# Altium footprint library S_S.PcbLib: 51 footprints (part 1 of 4)
Each footprint in its own frame and in the unit in brackets; x right, y up, seen from the top. Pads: shape width x height; smd on the part's side, far side on the other; paste and mask are expansions set on the pad; w line width, h text height; cw(c..) or ccw(c..) is an arc to the next point about the centre after c.
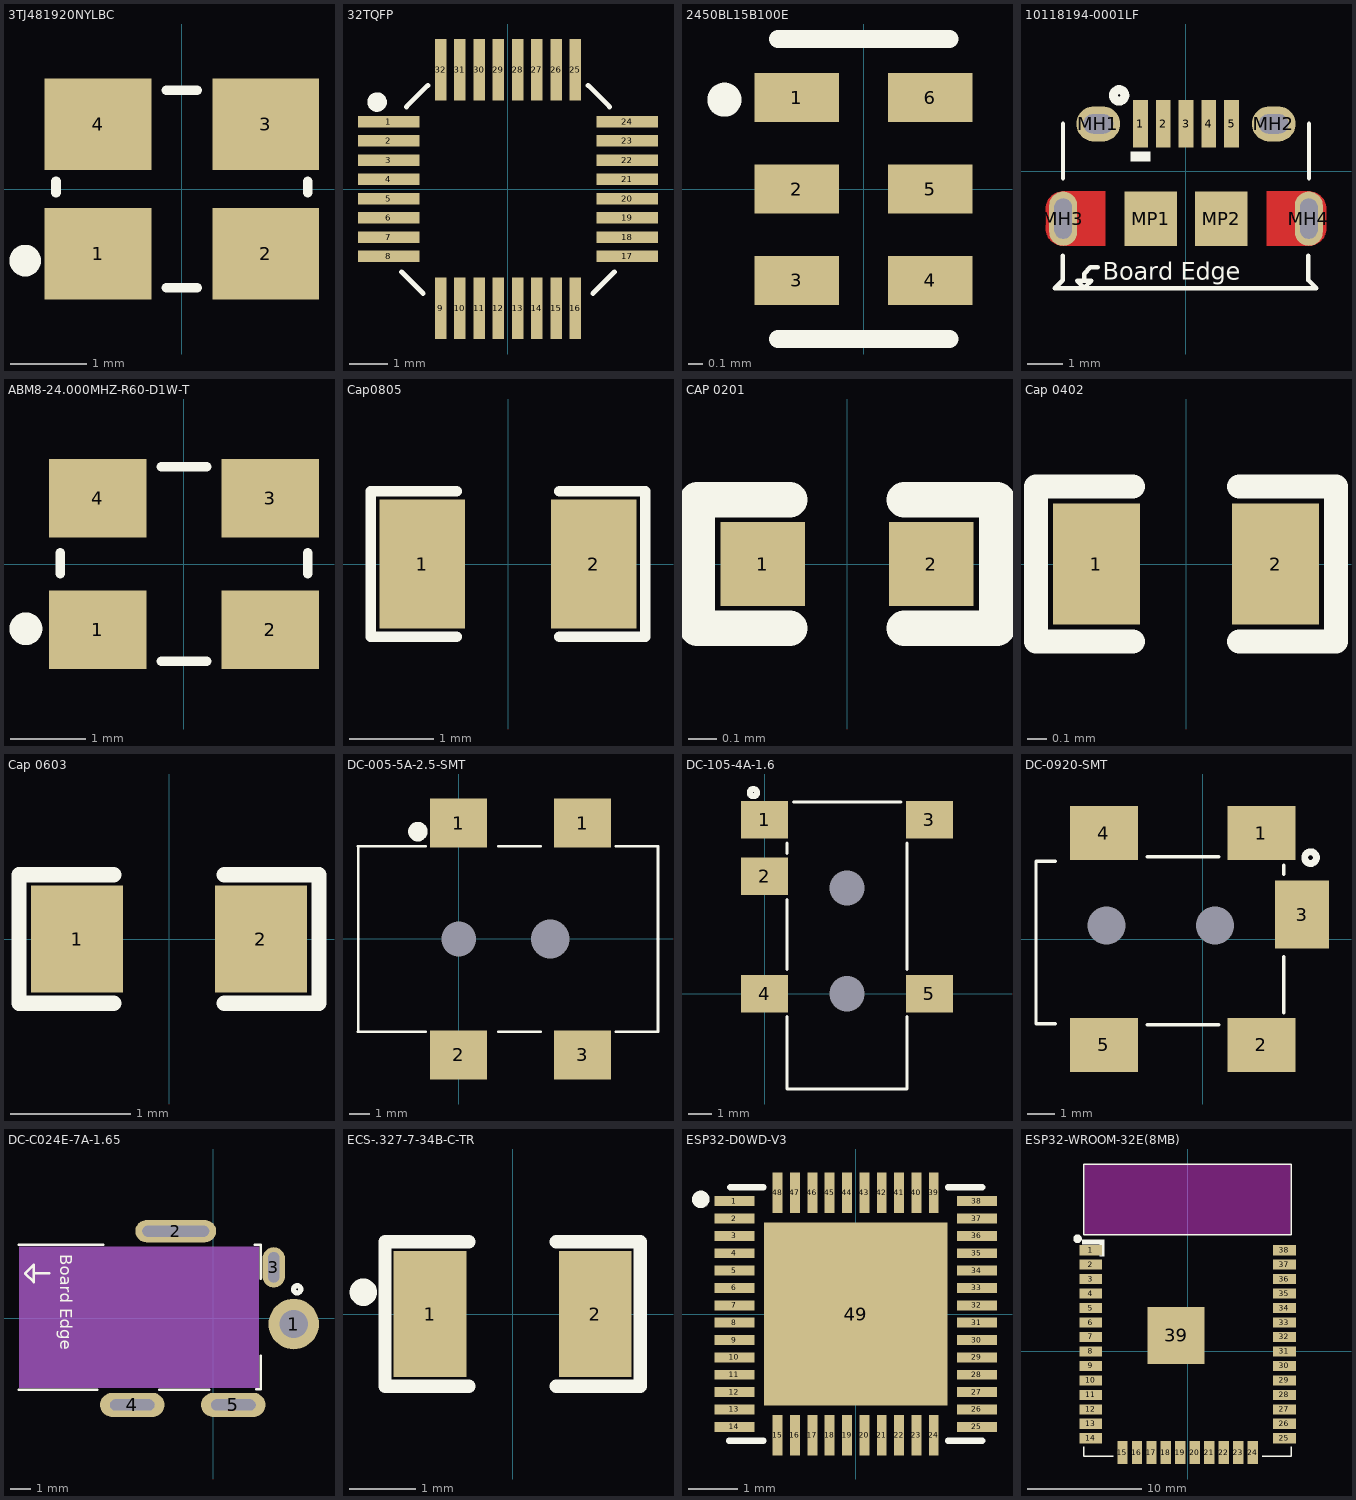
[diagram p0: the footprints below, top view; thin cyan lines are the x and y axes]

## 3TJ481920NYLBC [mm]
pads (4):
  rect 1.4x1.2 smd mask+0.07: 1(-1.1,-0.85) 2(1.1,-0.85) 3(1.1,0.85) 4(-1.1,0.85)
Top Overlay:
  circle w0.254: c-2.057,-0.94 r0.08
  lines w0.127: -1.651,-0.051 -1.651,0.102 ; -0.203,-1.295 0.203,-1.295 ; -0.203,1.295 0.203,1.295 ; 1.651,-0.051 1.651,0.102
3D body "User Library-XTAL-3_2x2_5.step": height 0.91, standoff -0.01, extent -1.6,-1.25 1.6,1.25

## 32TQFP [mm]
pads (32):
  rect 1.6x0.3 smd: 1(-3.1,1.75) 2(-3.1,1.25) 3(-3.1,0.75) 4(-3.1,0.25) 5(-3.1,-0.25) 6(-3.1,-0.75) 7(-3.1,-1.25) 8(-3.1,-1.75) 17(3.1,-1.75) 18(3.1,-1.25) 19(3.1,-0.75) 20(3.1,-0.25) 21(3.1,0.25) 22(3.1,0.75) 23(3.1,1.25) 24(3.1,1.75)
  rect 0.3x1.6 smd: 9(-1.75,-3.1) 10(-1.25,-3.1) 11(-0.75,-3.1) 12(-0.25,-3.1) 13(0.25,-3.1) 14(0.75,-3.1) 15(1.25,-3.1) 16(1.75,-3.1) 25(1.75,3.1) 26(1.25,3.1) 27(0.75,3.1) 28(0.25,3.1) 29(-0.25,3.1) 30(-0.75,3.1) 31(-1.25,3.1) 32(-1.75,3.1)
Top Overlay:
  circle w0.254: c-3.404,2.261 r0.127
  lines w0.127: -2.767,-2.158 -2.208,-2.716 ; -2.642,2.134 -2.083,2.692 ; 2.083,2.692 2.642,2.134 ; 2.208,-2.716 2.767,-2.158
3D body "User Library-TQFP32-5.STEP": height 1.25, standoff 0.02, extent -3.5,-3.505 3.5,3.495

## 2450BL15B100E [mm]
pads (6):
  rect 0.6x0.35 smd: 1(-0.475,0.65) 2(-0.475,0) 3(-0.475,-0.65) 4(0.475,-0.65) 5(0.475,0) 6(0.475,0.65)
Top Overlay:
  circle w0.2: c-0.991,0.635 r0.021
  lines w0.127: -0.609,-1.067 0.61,-1.067 ; -0.609,1.067 0.61,1.067
3D body "User Library-Balun2450FB15L0001.step": height 0.8, standoff 0, extent -0.624,-1 0.626,1

## 10118194-0001LF [mm]
pads (11):
  rect 0.42x1.35 smd: 1(-1.3,1.35) 2(-0.65,1.35) 3(0,1.35) 4(0.65,1.35) 5(1.3,1.35)
  oval 1.25x1 hole 0.55 slot 0.85 at 0 deg: MH1(-2.5,1.35) MH2(2.5,1.35)
  oval 0.8x1.55 hole 0.5 slot 1.15 at 90 deg: MH3(-3.5,-1.35) MH4(3.5,-1.35)
  rect 1.5x1.55 smd: MP1(-1,-1.35) MP2(1,-1.35)
Top Layer:
  region: 192 vertices and 0 holes, not listed, extent 2.3,-2.13 4,-0.575
  region: 192 vertices and 0 holes, not listed, extent -4,-2.125 -2.3,-0.57
Top Overlay:
  circle w0.254: c-1.905,2.163 r0.163
  rectangle: -1.575,0.283 -1.016,0.563
  lines w0.127: -3.511,-3.104 -3.511,-2.404 ; -3.511,-3.099 -3.511,-3.109 -3.739,-3.338 3.718,-3.338 3.489,-3.109 ; -3.505,-0.199 -3.505,1.35 ; -2.521,-2.74 -2.725,-2.74 -2.902,-2.918 -2.902,-3.121 ; 3.489,-3.104 3.489,-2.404 ; 3.505,-0.199 3.505,1.35 ; -2.902,-3.121 -2.699,-3.121 -2.862,-3.285 -2.942,-3.285 -3.106,-3.121 -2.902,-3.121
  text "Board Edge" at -2.367,-3.088 h0.5
3D body "10118194-0001LF--3DModel-STEP-56544.STEP": height 2.87, standoff -0.4, extent -4.017,-3.988 4.033,1.542

## ABM8-24.000MHZ-R60-D1W-T [mm]
pads (4):
  rect 1.3x1.05 smd: 1(-1.15,-0.875) 2(1.15,-0.875) 3(1.15,0.875) 4(-1.15,0.875)
Top Overlay:
  circle w0.254: c-2.108,-0.864 r0.092
  lines w0.127: -1.651,-0.127 -1.651,0.152 ; -0.305,-1.295 0.305,-1.295 ; -0.305,1.295 0.305,1.295 ; 1.651,-0.127 1.651,0.152
3D body "ABM8-24.000MHZ-R60-D-1-W-T.STEP": height 0.8, standoff 0, extent -1.6,-1.25 1.6,1.25

## Cap0805 [mil] "SMD 0805"
pads (2):
  rect 40x60 smd mask+2.76: 1(-40,0) 2(40,0)
Top Overlay:
  lines w5: -24,-34 -64,-34 -64,34 -24,34 ; 24,-34 64,-34 64,34 24,34
3D body "User Library-0805 SMD Capacitor.step": height 30, standoff -0.79, extent -39.36,-24.6 39.38,24.61

## CAP 0201 [mm]
pads (2):
  rect 0.3x0.3 smd mask+0.055: 1(-0.3,0) 2(0.3,0)
Top Overlay:
  lines w0.127: -0.203,-0.229 -0.533,-0.229 -0.533,0.229 -0.203,0.229 ; 0.203,-0.229 0.533,-0.229 0.533,0.229 0.203,0.229
3D body "User Library-SMD Ceramic Capacitors_0201 (0603)_AB.STEP": height 0.28, standoff -0.02, extent -0.3,-0.15 0.301,0.15

## Cap 0402 [mil]
pads (2):
  rect 18x25 smd mask+2.36: 1(-18.5,0) 2(18.5,0)
Top Overlay:
  lines w5: -11,-16 -31,-16 -31,16 -11,16 ; 11,-16 31,-16 31,16 11,16
3D body "User Library-Capacitor 0402.step": height 18.5, standoff -1.18, extent -19.68,-9.84 19.7,9.85

## Cap 0603 [mil]
pads (2):
  rect 30x35 smd mask+2.36: 1(-30,0) 2(30,0)
Top Overlay:
  lines w5: -18,-21 -49,-21 -49,21 -18,21 ; 18,-21 49,-21 49,21 18,21
3D body "User Library-CAPC1608X09.step": height 34.25, standoff -1.18, extent -31.51,-15.75 31.49,15.74

## DC-005-5A-2.5-SMT [mm]
pads (6):
  rect 2.8x2.4 smd: 1(0,5.7) 1(6.1,5.7) 2(0,-5.7) 3(6.1,-5.7)
  round 0 hole 1.7 unplated: MH1(0,0)
  round 0 hole 1.9 unplated: MH2(4.5,0)
Top Overlay:
  circle w0.5: c-2.007,5.283 r0.231
  lines w0.127: -4.953,-4.557 -1.626,-4.557 ; -4.953,4.557 -1.626,4.557 ; -4.949,-4.557 -4.949,4.557 ; 1.956,-4.557 4.035,-4.557 ; 1.956,4.557 4.035,4.557 ; 7.726,-4.557 9.804,-4.557 9.805,4.557 7.726,4.557
3D body "CUI-PJ-002A-SMT.step": height 11.17, standoff -1.03, extent -4.987,-6.274 9.813,6.326

## DC-105-4A-1.6 [mm]
pads (7):
  rect 2x1.6 smd: 1(0,7.4) 2(0,5) 3(7,7.4) 4(0,0) 5(7,0)
  round 0 hole 1.5 unplated: MH1(3.5,4.5) MH2(3.5,0)
Top Overlay:
  circle w0.254: c-0.483,8.56 r0.155
  lines w0.127: 0.94,-0.965 0.94,-4.047 6.06,-4.047 6.06,-0.965 ; 0.94,1.041 0.94,4.013 ; 0.94,5.969 0.94,6.426 ; 1.219,8.153 5.791,8.153 ; 6.06,1.041 6.06,4.013 6.06,5.969 6.06,6.426

## DC-0920-SMT [mm]
pads (7):
  rect 2.5x2 smd: 1(2.15,3.9) 2(2.15,-3.9) 4(-3.65,3.9) 5(-3.65,-3.9)
  rect 2x2.5 smd: 3(3.65,0.9)
  round 0 hole 1.4 unplated: 7(0.45,0.5) 8(-3.55,0.5)
Top Overlay:
  circle w0.254: c3.962,2.997 r0.216
  lines w0.127: -5.436,-3.124 -6.147,-3.124 -6.147,2.87 -5.436,2.87 ; -2.057,-3.15 0.584,-3.15 ; -2.057,3.023 0.584,3.023 ; 2.972,-2.718 2.972,-2.388 2.972,-0.66 ; 2.972,2.388 2.972,2.718
3D body "dc-0920-smt.stp": height 4.8, standoff -0.4, extent -6.087,-4.409 4.207,4.191

## DC-C024E-7A-1.65 [mm]
pads (5):
  round 2.5 hole 1.4: 1(3.995,-0.3)
  oval 4x1.1 hole 0.55 slot 3.3 at 0 deg: 2(-1.845,4.3)
  oval 1.1x2 hole 0.55 slot 1.5 at 90 deg: 3(3.005,2.507)
  oval 3.2x1.2 hole 0.55 slot 2.2 at 0 deg: 4(-3.995,-4.3) 5(1.005,-4.3)
Top Overlay:
  circle w0.254: c4.166,1.422 r0.18
  lines w0.127: -9.601,-3.556 -5.74,-3.556 ; -9.601,3.632 -5.436,3.632 ; -8.103,2.21 -8.865,2.21 ; -2.667,-3.556 -0.178,-3.556 ; 2.057,3.632 2.353,3.632 2.353,1.947 ; 2.134,-3.531 2.362,-3.531 ; -8.865,2.21 -8.865,2.642 -9.296,2.21 -8.865,1.778 -8.865,2.21
  lines w0.128: 2.362,-3.531 2.362,-1.88
  text "Board Edge" at -7.565,3.162 h0.6
Mechanical 1:
  pour cut-out: 2.261,3.531 -9.601,3.531 -9.601,-3.454 2.261,-3.454
3D body "dc-c024e-7a-165.stp": height 5.05, standoff -0.75, extent -9.565,-4.48 4.435,4.521

## ECS-.327-7-34B-C-TR [mm] "CRYSTAL 32.7680KHZ 12.5PF SMD"
pads (2):
  rect 1.1x1.9 smd: 1(-1.25,0) 2(1.25,0)
Top Overlay:
  circle w0.254: c-2.261,0.33 r0.08
  lines w0.2: -0.66,-1.092 -1.93,-1.092 -1.93,1.092 -0.66,1.092 ; 0.66,-1.092 1.93,-1.092 1.93,1.092 0.66,1.092
3D body "ECS-.327-12.5-34B-C-TR--3DModel-STEP-40055.STEP": height 0.87, standoff -0.03, extent -1.6,-0.775 1.6,0.725

## ESP32-D0WD-V3 [mm]
pads (49):
  rect 0.81x0.2 smd: 1(-2.445,2.275) 2(-2.445,1.925) 3(-2.445,1.575) 4(-2.445,1.225) 5(-2.445,0.875) 6(-2.445,0.525) 7(-2.445,0.175) 8(-2.445,-0.175) 9(-2.445,-0.525) 10(-2.445,-0.875) 11(-2.445,-1.225) 12(-2.445,-1.575) 13(-2.445,-1.925) 14(-2.445,-2.275) 25(2.445,-2.275) 26(2.445,-1.925) 27(2.445,-1.575) 28(2.445,-1.225) 29(2.445,-0.875) 30(2.445,-0.525) 31(2.445,-0.175) 32(2.445,0.175) 33(2.445,0.525) 34(2.445,0.875) 35(2.445,1.225) 36(2.445,1.575) 37(2.445,1.925) 38(2.445,2.275)
  rect 0.2x0.81 smd: 15(-1.575,-2.445) 16(-1.225,-2.445) 17(-0.875,-2.445) 18(-0.525,-2.445) 19(-0.175,-2.445) 20(0.175,-2.445) 21(0.525,-2.445) 22(0.875,-2.445) 23(1.225,-2.445) 24(1.575,-2.445) 39(1.575,2.445) 40(1.225,2.445) 41(0.875,2.445) 42(0.525,2.445) 43(0.175,2.445) 44(-0.175,2.445) 45(-0.525,2.445) 46(-0.875,2.445) 47(-1.225,2.445) 48(-1.575,2.445)
  rect 3.7x3.7 smd paste-3: 49(0,0)
Top Overlay:
  circle w0.2: c-3.124,2.311 r0.076
  lines w0.127: -2.555,-2.555 -1.86,-2.555 ; -2.53,2.555 -1.86,2.555 ; 1.86,-2.555 2.555,-2.555 ; 1.86,2.555 2.555,2.555
3D body "ESP32-D0WD--3DModel-STEP-56544.STEP": height 0.9, standoff 0, extent -2.5,-2.5 2.5,2.5

## ESP32-WROOM-32E(8MB) [mm]
pads (39):
  rect 2x0.9 smd: 1(-8.5,8.88) 2(-8.5,7.61) 3(-8.5,6.34) 4(-8.5,5.07) 5(-8.5,3.8) 6(-8.5,2.53) 7(-8.5,1.26) 8(-8.5,-0.01) 9(-8.5,-1.28) 10(-8.5,-2.55) 11(-8.5,-3.82) 12(-8.5,-5.09) 13(-8.5,-6.36) 14(-8.5,-7.63) 25(8.5,-7.63) 26(8.5,-6.36) 27(8.5,-5.09) 28(8.5,-3.82) 29(8.5,-2.55) 30(8.5,-1.28) 31(8.5,-0.01) 32(8.5,1.26) 33(8.5,2.53) 34(8.5,3.8) 35(8.5,5.07) 36(8.5,6.34) 37(8.5,7.61) 38(8.5,8.88)
  rect 0.9x2 smd: 15(-5.715,-8.88) 16(-4.445,-8.88) 17(-3.175,-8.88) 18(-1.905,-8.88) 19(-0.635,-8.88) 20(0.635,-8.88) 21(1.905,-8.88) 22(3.175,-8.88) 23(4.445,-8.88) 24(5.715,-8.88)
  rect 5x5 smd: 39(-1,1.41)
Top Overlay:
  circle w0.5: c-9.652,9.881 r0.125
  rectangle: -7.709,8.328 -7.291,9.406
  rectangle: -9.271,9.362 -7.291,9.802
  lines w0.127: -9.093,-8.382 -9.093,-9.22 -6.528,-9.195 ; 6.528,-9.195 9.093,-9.22 9.093,-8.382 ; 9.082,10.244 -9.1,10.244 -9.1,16.434 9.087,16.434 9.087,10.244
Keep-Out Layer:
  rectangle: -9.046,10.287 9.038,16.383
3D body "esp-wroom-32.stp": height 3, standoff -0.04, extent -9.042,-9.163 9.028,16.377